# Altium footprint library Module_Arduino.PcbLib: 6 footprints
Each footprint in its own frame and in the unit in brackets; x right, y up, seen from the top. Pads: shape width x height; smd on the part's side, far side on the other; paste and mask are expansions set on the pad; w line width, h text height; cw(c..) or ccw(c..) is an arc to the next point about the centre after c.
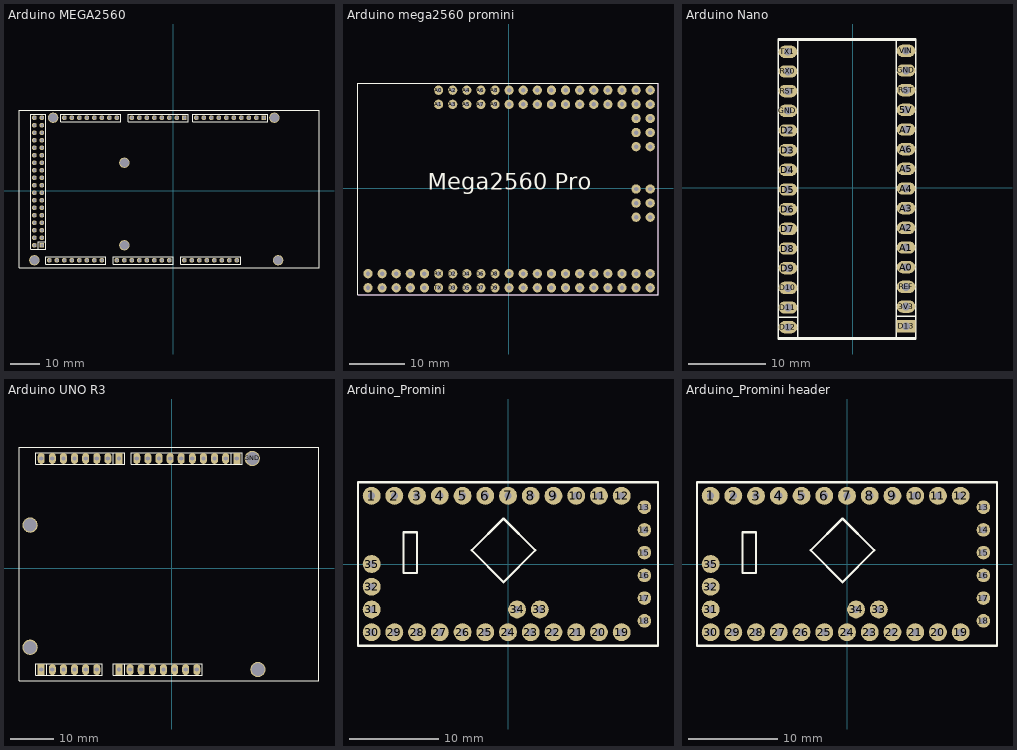
[diagram p0: the footprints below, top view; thin cyan lines are the x and y axes]

## Arduino MEGA2560 [mm]
height 8.5
pads (98):
  round 1.6 hole 1.1: 0-RX(-13.97,24.765) 1-TX(-11.43,24.765) 2(-8.89,24.765) 3V3(13.97,-23.495) 4(-3.81,24.765) 5V(-46.99,24.765) 5V(-44.45,24.765) 5V(11.43,-23.495) 8(7.874,24.765) 12(18.034,24.765) 13(20.574,24.765) 14(-19.05,24.765) 15(-21.59,24.765) 16(-24.13,24.765) 17(-26.67,24.765) 18(-29.21,24.765) 19(-31.75,24.765) 20(-34.29,24.765) 21(-36.83,24.765) 22(-44.45,22.225) 23(-46.99,22.225) 24(-44.45,19.685) 25(-46.99,19.685) 26(-44.45,17.145) 27(-46.99,17.145) 28(-44.45,14.605) 29(-46.99,14.605) 30(-44.45,12.065) 31(-46.99,12.065) 32(-44.45,9.525) 33(-46.99,9.525) 34(-44.45,6.985) 35(-46.99,6.985) 36(-44.45,4.445) 37(-46.99,4.445) 38(-44.45,1.905) 39(-46.99,1.905) 40(-44.45,-0.635) 41(-46.99,-0.635) 42(-44.45,-3.175) 43(-46.99,-3.175) 44(-44.45,-5.715) 45(-46.99,-5.715) 46(-44.45,-8.255) 47(-46.99,-8.255) 48(-44.45,-10.795) 49(-46.99,-10.795) 50(-44.45,-13.335) 51(-46.99,-13.335) 52(-44.45,-15.875) 53(-46.99,-15.875) A0(-1.27,-23.495) A1(-3.81,-23.495) A2(-6.35,-23.495) A3(-8.89,-23.495) A4(-11.43,-23.495) A5(-13.97,-23.495) A6(-16.51,-23.495) A7(-19.05,-23.495) A8(-24.13,-23.495) A9(-26.67,-23.495) A10(-29.21,-23.495) A11(-31.75,-23.495) A12(-34.29,-23.495) A13(-36.83,-23.495) A14(-39.37,-23.495) A15(-41.91,-23.495) AREF(25.654,24.765) GND(-46.99,-18.415) GND(6.35,-23.495) GND(8.89,-23.495) GND(23.114,24.765) IOREF(19.05,-23.495) RESET(16.51,-23.495) SDA(28.194,24.765) Vin(3.81,-23.495) ~3(-6.35,24.765) ~5(-1.27,24.765) ~6(1.27,24.765) ~9(10.414,24.765) ~10(12.954,24.765) ~11(15.494,24.765) ""(21.59,-23.495)
  rect 1.6x1.6 hole 1.1: 7(3.81,24.765) GND(-44.45,-18.415) SCL(30.734,24.765)
  round 3.5 hole 3: GND(-46.99,-23.495) GND(-40.64,24.765) GND(-16.51,-18.415) GND(-16.51,9.525) GND(34.29,24.765) GND(35.56,-23.495)
  round 0 all layers, no hole: ""(-46.99,-23.495) ""(-40.64,24.765) ""(-16.51,-18.415) ""(-16.51,9.525) ""(34.29,24.765) ""(35.56,-23.495)
Top Overlay:
  lines w0.2: -45.72,-19.685 -45.72,-17.145 -43.18,-17.145 ; -33.02,23.495 -17.78,23.495 ; -33.02,26.035 -17.78,26.035 ; -27.94,-24.765 -43.18,-24.765 ; -27.94,-22.225 -43.18,-22.225 ; -15.24,-24.765 0,-24.765 ; -15.24,-22.225 0,-22.225 ; -43.18,-24.765 -43.18,-22.225 ; -43.18,-24.765 -22.86,-24.765 -22.86,-22.225 -43.18,-22.225 ; -43.18,-24.765 -43.18,-22.225 ; -17.78,23.495 -17.78,26.035 ; -17.78,23.495 -38.1,23.495 -38.1,26.035 -17.78,26.035 ; -17.78,23.495 -17.78,26.035 ; 0,-24.765 0,-22.225 ; 0,-24.765 -20.32,-24.765 -20.32,-22.225 0,-22.225 ; 0,-24.765 0,-22.225 ; -52.197,-26.035 49.403,-26.035 49.403,18.796 49.403,27.305 -52.197,27.305 -52.197,24.511 -52.197,-26.035 ; -48.26,-19.685 -43.18,-19.685 -43.18,26.035 -48.26,26.035 -48.26,-19.685 ; -15.24,23.495 -15.24,26.035 5.08,26.035 5.08,23.495 -15.24,23.495 ; 2.54,-24.765 2.54,-22.225 22.86,-22.225 22.86,-24.765 2.54,-24.765 ; 6.604,23.495 30.099,23.495 32.004,23.495 32.004,26.035 6.604,26.035 6.604,23.495
Top Designator:
  text ".Designator" at -1.686,0.304 h1.52
3D body "Arduino_Mega_2560.step": height 14.58, standoff -1, extent -52.019,-26.06 56.346,27.431
3D body "61303621121.stp": height 8.55, standoff -2.99, extent -48.26,-19.685 -43.18,26.035
3D body "61300811121.stp": height 8.54, standoff -3, extent -38.1,23.495 -17.78,26.035
3D body "61300811121.stp": height 8.54, standoff -3, extent -43.18,-24.765 -22.86,-22.225
3D body "61301011121.stp": height 8.54, standoff -3, extent 6.604,23.495 32.004,26.035
3D body "61300811121.stp": height 8.54, standoff -3, extent 2.54,-24.765 22.86,-22.225
3D body "61300811121.stp": height 8.54, standoff -3, extent -15.24,23.495 5.08,26.035
3D body "61300811121.stp": height 8.54, standoff -3, extent -20.32,-24.765 0,-22.225

## Arduino mega2560 promini [mil]
pads (86):
  round 66 hole 31.5: 3V3_1(-696.06,-705) 3V3_2(-696.06,-605) 5V_1(-796.06,-705) 5V_2(-796.06,-605) 5V_3(1003.94,-5) A0(-496.06,695) A1(-496.06,595) A2(-396.06,695) A3(-396.06,595) A4(-296.06,695) A5(-296.06,595) A6(-196.06,695) A7(-196.06,595) A8(-96.06,695) A9(-96.06,595) A10(3.94,695) A11(3.94,595) A12(103.94,695) A13(103.94,595) A14(203.94,695) A15(203.94,595) AREF(-596.06,-605) D2(-396.06,-605) D3(-396.06,-705) D4(-296.06,-605) D5(-296.06,-705) D6(-196.06,-605) D7(-196.06,-705) D8(-96.06,-605) D9(-96.06,-705) D10(3.94,-605) D11(3.94,-705) D12(103.94,-605) D13(103.94,-705) D14(203.94,-605) D15(203.94,-705) D16(303.94,-605) D17(303.94,-705) D18(403.94,-605) D19(403.94,-705) D20(503.94,-605) D21(503.94,-705) D22(603.94,-605) D23(603.94,-705) D24(703.94,-605) D25(703.94,-705) D26(803.94,-605) D27(803.94,-705) D28(903.94,-605) D29(903.94,-705) D30(1003.94,-605) D31(1003.94,-705) D32(303.94,695) D33(303.94,595) D34(403.94,695) D35(403.94,595) D36(503.94,695) D37(503.94,595) D38(603.94,695) D39(603.94,595) D40(703.94,695) D41(703.94,595) D42(803.94,695) D43(803.94,595) D44(903.94,695) D45(903.94,595) D46(1003.94,695) D47(1003.94,595) D48(1003.94,495) D49(903.94,495) D50(1003.94,395) D51(903.94,395) D52(1003.94,295) D53(903.94,295) GND_1(-896.06,-705) GND_2(-896.06,-605) GND_3(1003.94,-205) MISO(903.94,-5) MOSI(1003.94,-105) RESET(903.94,-205) RST(-596.06,-705) RX(-496.06,-605) SCK(903.94,-105) TX(-496.06,-705) VIN_1(-996.06,-705) VIN_2(-996.06,-605)
Top Overlay:
  lines w5: -1066.93,-753.03 1059.06,-753.03 1059.06,743.03 -1066.93,743.03 -1066.93,-753.03
  text "Mega2560 Pro" at -573.39,-49.04 h200
Top Designator:
  text ".Designator" at -152.38,-18.02 h60
Mechanical 13:
  lines w5: -1066.93,-753.03 1059.06,-753.03 1059.06,743.03 -1066.93,743.03 -1066.93,-753.03
3D body "Header-F-2.54-2X32.stp": height 338.58, standoff -122.05, extent -551.97,546.57 1057.87,743.43
3D body "HEADER 2.54-2X4.stp": height 511.81, standoff 59.06, extent 853.94,-753.43 1053.94,-553.43
3D body "HEADER 2.54-2X6.stp": height 511.81, standoff 59.06, extent 855.51,-255 1055.51,45
3D body "HEADER 2.54-2X6.stp": height 511.81, standoff 59.06, extent 855.51,245 1055.51,545
3D body "HEADER 2.54-2X32.stp": height 511.81, standoff 59.06, extent -546.06,546.57 1053.94,746.57
3D body "HEADER 2.54-2X38.stp": height 511.81, standoff 59.06, extent -1046.06,-753.43 853.94,-553.43
3D body "Header-F-2.54-2X6.stp": height 338.58, standoff -122.05, extent 855.51,-260.91 1052.36,48.94
3D body "Header-F-2.54-2X6.stp": height 338.58, standoff -122.05, extent 855.51,239.09 1052.36,548.94
3D body "Header-F-2.54-2X4.stp": height 338.58, standoff -122.05, extent 848.82,-752.24 1058.66,-555.39
3D body "Header-F-2.54-2X38.stp": height 338.58, standoff -122.05, extent -1050,-753.43 859.84,-556.57
3D body "MEGA 2560 PRO (EMBED).stp": height 627.7, standoff 392.7, extent -1074.17,-751.97 1055.12,744.1

## Arduino Nano [mm]
height 8.5
pads (30):
  oval 2.4x1.6 hole 1: 3V3(6.858,-15.367) 5V(6.858,10.033) A0(6.858,-10.287) A1(6.858,-7.747) A2(6.858,-5.207) A3(6.858,-2.667) A4(6.858,-0.127) A5(6.858,2.413) A6(6.858,4.953) A7(6.858,7.493) D2(-8.382,7.366) D3(-8.382,4.826) D4(-8.382,2.286) D5(-8.382,-0.254) D6(-8.382,-2.794) D7(-8.382,-5.334) D8(-8.382,-7.874) D9(-8.382,-10.414) D10(-8.382,-12.954) D11(-8.382,-15.494) D12(-8.382,-18.034) GND(-8.382,9.906) GND(6.858,15.113) REF(6.858,-12.827) RST(-8.382,12.446) RST(6.858,12.573) RX0(-8.382,14.986) TX1(-8.382,17.526) VIN(6.858,17.653)
  rect 2.4x1.6 hole 1: D13(6.858,-17.907)
Top Overlay:
  lines w0.2: -9.652,-16.764 -7.112,-16.764 ; -9.652,-6.727 -9.652,-4.572 ; -9.652,-6.354 -9.652,-19.554 ; -9.652,-4.699 -9.652,19.046 -7.112,19.046 ; -9.652,18.288 -9.652,19.177 8.128,19.177 ; -8.128,-19.554 8.128,-19.554 8.128,-19.177 ; -7.112,-6.727 -7.112,19.05 8.128,19.05 8.128,19.177 ; -7.112,-6.354 -7.112,-19.554 -9.652,-19.554 ; 5.588,-16.637 8.128,-16.637 ; 5.588,-6.6 5.588,-4.445 ; 5.588,-6.227 5.588,-19.427 8.128,-19.427 8.128,-6.227 ; 5.588,-4.572 5.588,19.173 8.128,19.173 ; 6.096,-19.427 -9.652,-19.427 -9.652,-19.554 ; 8.128,-6.6 8.128,19.177
Top Designator:
  text ".Designator" at -4.472,-1.36 h1.52
3D body "61301011821.stp": height 8.51, standoff -3.09, extent -9.632,-6.854 -7.132,19.046
3D body "61300511821.stp": height 8.51, standoff -3.09, extent -9.632,-19.554 -7.132,-6.354
3D body "61300511821.stp": height 8.51, standoff -3.09, extent 5.608,-19.427 8.108,-6.227
3D body "61301011821.stp": height 8.51, standoff -3.09, extent 5.608,-6.727 8.108,19.173
3D body "User Library-Nano-1.STEP": height 21.18, standoff 2.62, extent -9.652,-23.476 8.138,21.444

## Arduino UNO R3 [mm]
height 8.5
pads (40):
  oval 1.6x2.5 hole 1: 0-RX(-29.845,25.146) 1-TX(-27.305,25.146) 2(-24.765,25.146) 3V3(-1.905,-23.114) 4(-19.685,25.146) 5V(-4.445,-23.114) 8(-8.001,25.146) 12(2.159,25.146) 13(4.699,25.146) A0(-17.145,-23.114) A1(-19.685,-23.114) A2(-22.225,-23.114) A3(-24.765,-23.114) A4(-27.305,-23.114) AREF(9.779,25.146) GND(-9.525,-23.114) GND(-6.985,-23.114) GND(7.239,25.146) IOREF(3.175,-23.114) NC(5.715,-23.114) RESET(0.635,-23.114) SDA(12.319,25.146) ~3(-22.225,25.146) ~5(-17.145,25.146) ~6(-14.605,25.146) ~9(-5.461,25.146) ~10(-2.921,25.146) ~11(-0.381,25.146)
  rect 1.6x2.5 hole 1: 7(-12.065,25.146) A5(-29.845,-23.114) SCL(14.859,25.146) Vin(-12.065,-23.114)
  round 3.5 hole 3: GND(18.415,25.146) ""(-32.385,-18.034) ""(-32.385,9.906) ""(19.685,-23.114)
  oval 0x2 all layers, no hole: ""(-32.385,-18.034)
  round 0 all layers, no hole: ""(-32.385,9.906) ""(18.415,25.146) ""(19.685,-23.114)
Top Overlay:
  lines w0.2: -28.575,-24.384 -28.575,-21.844 ; -13.335,23.876 -13.335,26.416 ; -10.795,-24.384 -10.795,-21.844 ; 13.589,23.876 13.589,26.416 ; -34.925,-25.654 -34.925,-8.255 -34.925,27.686 33.655,27.686 33.655,19.304 33.655,-25.654 -34.925,-25.654 ; -31.115,-24.384 -15.875,-24.384 -15.875,-21.844 -31.115,-21.844 -31.115,-24.384 ; -31.115,23.876 -10.795,23.876 -10.795,26.416 -31.115,26.416 -31.115,23.876 ; -13.335,-24.384 6.985,-24.384 6.985,-21.844 -13.335,-21.844 -13.335,-24.384 ; -9.271,23.876 -9.271,26.416 16.129,26.416 16.129,23.876 14.224,23.876 -9.271,23.876
Top Designator:
  text ".Designator" at -1.22,0.672 h1.52
3D body "61300811121.stp": height 8.54, standoff -3, extent -31.115,23.876 -10.795,26.416
3D body "61300811121.stp": height 8.54, standoff -3, extent -13.335,-24.384 6.985,-21.844
3D body "61300611121.stp": height 8.54, standoff -3, extent -31.115,-24.384 -15.875,-21.844
3D body "User Library-ARDUINO_UNO_R3_1.STEP": height 15.28, standoff 0.03, extent -34.925,-25.654 40.005,27.686
3D body "61301011121.stp": height 8.54, standoff -3, extent -9.271,23.876 16.129,26.416

## Arduino_Promini [mm]
pads (35):
  round 2 hole 0.8: 1(-15.24,7.62) 2(-12.7,7.62) 3(-10.16,7.62) 4(-7.62,7.62) 5(-5.08,7.62) 6(-2.54,7.62) 7(0,7.62) 8(2.54,7.62) 9(5.08,7.62) 10(7.62,7.62) 11(10.16,7.62) 12(12.7,7.62) 19(12.7,-7.62) 20(10.16,-7.62) 21(7.62,-7.62) 22(5.08,-7.62) 23(2.54,-7.62) 24(0,-7.62) 25(-2.54,-7.62) 26(-5.08,-7.62) 27(-7.62,-7.62) 28(-10.16,-7.62) 29(-12.7,-7.62) 30(-15.24,-7.62) 31(-15.24,-5.08) 32(-15.24,-2.54) 33(3.556,-5.08) 34(1.016,-5.08) 35(-15.24,0)
  round 1.524 hole 0.762: 13(15.24,6.35) 14(15.24,3.81) 15(15.24,1.27) 16(15.24,-1.27) 17(15.24,-3.81) 18(15.24,-6.35)
Top Overlay:
  lines w0.254: -16.764,-9.144 -16.764,9.144 16.256,9.144 16.764,9.144 16.764,-9.144 -16.764,-9.144 ; -11.684,-1.016 -11.684,3.556 -10.16,3.556 -10.16,-1.016 -11.684,-1.016 ; -4.064,1.524 -0.508,-2.032 3.048,1.524 -0.508,5.08 -4.064,1.524
Top Designator:
  text ".Designator" at -3.71,-0.344 h1.52
3D body "Pro-Mini.stp": height 4.12, standoff 0.02, extent -16.51,-8.89 16.51,8.89

## Arduino_Promini header [mm]
pads (35):
  round 2 hole 0.8: 1(-15.24,7.62) 2(-12.7,7.62) 3(-10.16,7.62) 4(-7.62,7.62) 5(-5.08,7.62) 6(-2.54,7.62) 7(0,7.62) 8(2.54,7.62) 9(5.08,7.62) 10(7.62,7.62) 11(10.16,7.62) 12(12.7,7.62) 19(12.7,-7.62) 20(10.16,-7.62) 21(7.62,-7.62) 22(5.08,-7.62) 23(2.54,-7.62) 24(0,-7.62) 25(-2.54,-7.62) 26(-5.08,-7.62) 27(-7.62,-7.62) 28(-10.16,-7.62) 29(-12.7,-7.62) 30(-15.24,-7.62) 31(-15.24,-5.08) 32(-15.24,-2.54) 33(3.556,-5.08) 34(1.016,-5.08) 35(-15.24,0)
  round 1.524 hole 0.762: 13(15.24,6.35) 14(15.24,3.81) 15(15.24,1.27) 16(15.24,-1.27) 17(15.24,-3.81) 18(15.24,-6.35)
Top Overlay:
  lines w0.254: -16.764,-9.144 16.764,-9.144 16.764,9.144 16.256,9.144 -16.764,9.144 -16.764,-9.144 ; -11.684,-1.016 -10.16,-1.016 -10.16,3.556 -11.684,3.556 -11.684,-1.016 ; -4.064,1.524 -0.508,5.08 3.048,1.524 -0.508,-2.032 -4.064,1.524
Top Designator:
  text ".Designator" at -3.71,-0.344 h1.52
3D body "Pro-Mini.stp": height 12.6, standoff 8.5, extent -16.51,-8.89 16.51,8.89
3D body "61300211821.stp": height 8.51, standoff -3.09, extent -16.76,6.37 -11.18,8.87
3D body "61300211821.stp": height 8.51, standoff -3.09, extent -11.68,6.37 -6.1,8.87
3D body "61300211821.stp": height 8.51, standoff -3.09, extent -6.6,6.37 -1.02,8.87
3D body "61300211821.stp": height 8.51, standoff -3.09, extent -1.52,6.37 4.06,8.87
3D body "61300211821.stp": height 8.51, standoff -3.09, extent 3.56,6.37 9.14,8.87
3D body "61300211821.stp": height 8.51, standoff -3.09, extent 8.64,6.37 14.22,8.87
3D body "61300211821.stp": height 8.51, standoff -3.09, extent -16.76,-8.87 -11.18,-6.37
3D body "61300211821.stp": height 8.51, standoff -3.09, extent -11.68,-8.87 -6.1,-6.37
3D body "61300211821.stp": height 8.51, standoff -3.09, extent -6.6,-8.87 -1.02,-6.37
3D body "61300211821.stp": height 8.51, standoff -3.09, extent -1.52,-8.87 4.06,-6.37
3D body "61300211821.stp": height 8.51, standoff -3.09, extent 3.56,-8.87 9.14,-6.37
3D body "61300211821.stp": height 8.51, standoff -3.09, extent 8.64,-8.87 14.22,-6.37
3D body "61300311821.stp": height 8.51, standoff -3.09, extent -16.49,-6.6 -13.99,1.52
3D body: height 11, standoff 3, extent -13.1,7.22 -12.3,8.02
3D body: height 11, standoff 3, extent -15.64,7.22 -14.84,8.02
3D body: height 11, standoff 3, extent -8.02,7.22 -7.22,8.02
3D body: height 11, standoff 3, extent -10.56,7.22 -9.76,8.02
3D body: height 11, standoff 3, extent -2.94,7.22 -2.14,8.02
3D body: height 11, standoff 3, extent -5.48,7.22 -4.68,8.02
3D body: height 11, standoff 3, extent 2.14,7.22 2.94,8.02
3D body: height 11, standoff 3, extent -0.4,7.22 0.4,8.02
3D body: height 11, standoff 3, extent 7.22,7.22 8.02,8.02
3D body: height 11, standoff 3, extent 4.68,7.22 5.48,8.02
3D body: height 11, standoff 3, extent 12.3,7.22 13.1,8.02
3D body: height 11, standoff 3, extent 9.76,7.22 10.56,8.02
3D body: height 11, standoff 3, extent 12.3,-8.02 13.1,-7.22
3D body: height 11, standoff 3, extent 9.76,-8.02 10.56,-7.22
3D body: height 11, standoff 3, extent 7.22,-8.02 8.02,-7.22
3D body: height 11, standoff 3, extent 4.68,-8.02 5.48,-7.22
3D body: height 11, standoff 3, extent 2.14,-8.02 2.94,-7.22
3D body: height 11, standoff 3, extent -0.4,-8.02 0.4,-7.22
3D body: height 11, standoff 3, extent -2.94,-8.02 -2.14,-7.22
3D body: height 11, standoff 3, extent -5.48,-8.02 -4.68,-7.22
3D body: height 11, standoff 3, extent -8.02,-8.02 -7.22,-7.22
3D body: height 11, standoff 3, extent -10.56,-8.02 -9.76,-7.22
3D body: height 11, standoff 3, extent -13.1,-8.02 -12.3,-7.22
3D body: height 11, standoff 3, extent -15.64,-8.02 -14.84,-7.22
3D body: height 11, standoff 3, extent -15.64,-2.94 -14.84,-2.14
3D body: height 11, standoff 3, extent -15.64,-5.48 -14.84,-4.68
3D body: height 11, standoff 3, extent -15.64,-0.4 -14.84,0.4
3D body: height 11, standoff 3, extent 3.156,-5.48 3.956,-4.68
3D body: height 11, standoff 3, extent 0.616,-5.48 1.416,-4.68
3D body "61300211821.stp": height 8.51, standoff -3.09, extent -0.504,-6.33 5.076,-3.83